# Altium footprint library 24V转5V芯片_TPS54560BDDAR.PcbLib: 1 footprints
Each footprint in its own frame and in the unit in brackets; x right, y up, seen from the top. Pads: shape width x height; smd on the part's side, far side on the other; paste and mask are expansions set on the pad; w line width, h text height; cw(c..) or ccw(c..) is an arc to the next point about the centre after c.
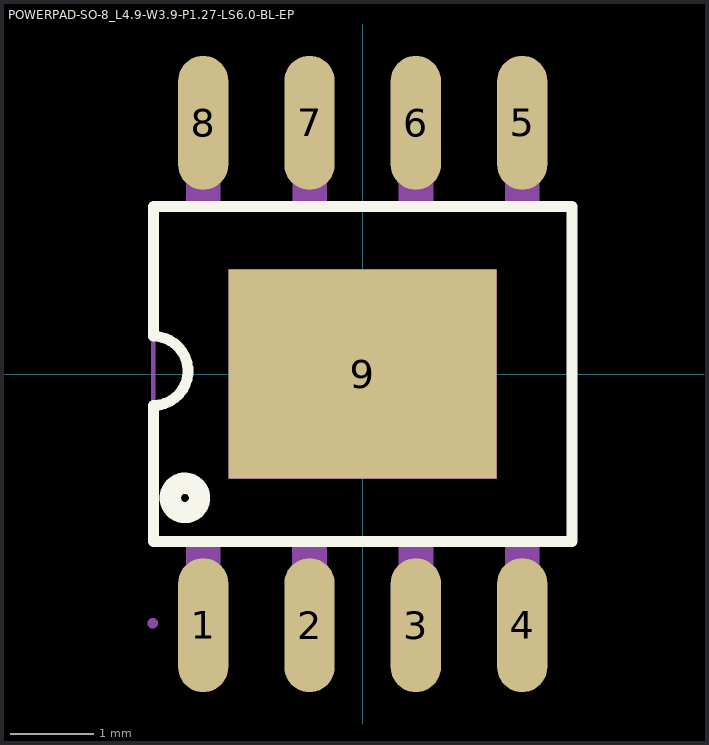
[diagram p0: the footprint, top view; thin cyan lines are the x and y axes]

## POWERPAD-SO-8_L4.9-W3.9-P1.27-LS6.0-BL-EP [mm]
pads (9):
  oval 0.6x1.6 smd: 1(-1.905,-3) 2(-0.635,-3) 3(0.635,-3) 4(1.905,-3) 5(1.905,3) 6(0.635,3) 7(-0.635,3) 8(-1.905,3)
  rect 3.2x2.5 smd: 9(0,0)
Top Overlay:
  circle w0.254: c-2.123,-1.48 r0.175
  lines w0.129: -2.499,-0.376 ccw(c-2.5,0.037) -2.5,0.45 -2.5,2 2.5,2 2.5,-2 -2.5,-2 -2.5,-0.375
Mechanical 2:
  circle w0.2: c-1.898,-3.235 r0.1
Mechanical 6:
  lines w0.051: -2.5,-1.97 -2.5,2.03 2.5,2.03 2.5,-1.97 -2.5,-1.97
Mechanical 7:
  region: -1.7,-2.573 -2.11,-2.573 -2.11,-1.953 -1.7,-1.953
  region: -0.43,-2.576 -0.84,-2.576 -0.84,-1.956 -0.43,-1.956
  region: 0.84,-2.573 0.43,-2.573 0.43,-1.953 0.84,-1.953
  region: 2.11,-2.568 1.7,-2.568 1.7,-1.948 2.11,-1.948
  region: -1.7,1.962 -2.11,1.962 -2.11,2.582 -1.7,2.582
  region: -0.427,1.99 -0.837,1.99 -0.837,2.61 -0.427,2.61
  region: 0.843,1.982 0.433,1.982 0.433,2.602 0.843,2.602
  region: 2.11,1.962 1.7,1.962 1.7,2.582 2.11,2.582
Mechanical 8:
  region: -2.446,-2.976 -2.446,-3.001 -2.481,-3.036 -2.531,-3.036 -2.566,-3.001 -2.566,-2.976 -2.566,-2.952 -2.531,-2.916 -2.481,-2.916 -2.446,-2.952 -2.446,-2.976
Mechanical 9:
  region: -1.6,1.25 1.6,1.25 1.6,-1.25 -1.6,-1.25
  region: -1.7,-2.97 -2.11,-2.97 -2.11,-2.57 -1.7,-2.57
  region: -0.43,-2.972 -0.84,-2.972 -0.84,-2.572 -0.43,-2.572
  region: 0.84,-2.97 0.43,-2.97 0.43,-2.57 0.84,-2.57
  region: 2.11,-2.962 1.7,-2.962 1.7,-2.562 2.11,-2.562
  region: -1.7,2.577 -2.11,2.577 -2.11,2.977 -1.7,2.977
  region: -0.43,2.605 -0.84,2.605 -0.84,3.005 -0.43,3.005
  region: 0.84,2.597 0.43,2.597 0.43,2.997 0.84,2.997
  region: 2.11,2.58 1.7,2.58 1.7,2.98 2.11,2.98